# Altium integrated library 2606-1102.IntLib: 2 symbols
Pins are listed as number, name and electrical type; pins without a type are passive.

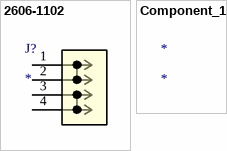
[diagram p0: symbols 2606-1102 to Component_1]

## 2606-1102
designator J?
No Description Available; Mfr_Name: Wago; RefDes: RefDes; Type: Type
footprint CONN2_2606-1102_WAG
pins: 1 1_1, 2 1_2, 3 2_1, 4 2_2

## Component_1
designator *